# Altium footprint library 615008160021.PcbLib: 1 footprints
Each footprint in its own frame and in the unit in brackets; x right, y up, seen from the top. Pads: shape width x height; smd on the part's side, far side on the other; paste and mask are expansions set on the pad; w line width, h text height; cw(c..) or ccw(c..) is an arc to the next point about the centre after c.
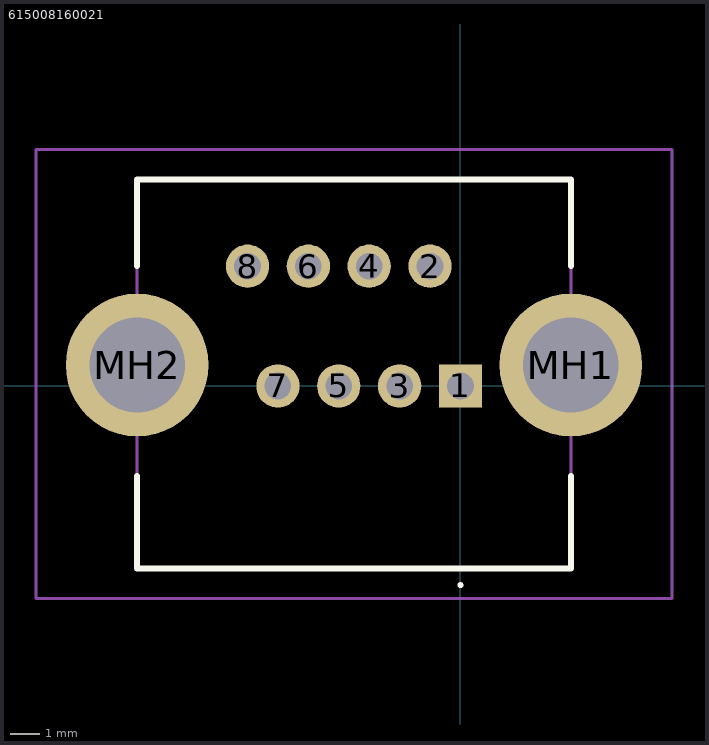
[diagram p0: the footprint, top view; thin cyan lines are the x and y axes]

## 615008160021 [mm]
pads (10):
  rect 1.446x1.446 hole 0.89: 1(0,0)
  round 1.446 hole 0.89: 2(-1.016,4) 3(-2.032,0) 4(-3.048,4) 5(-4.064,0) 6(-5.08,4) 7(-6.096,0) 8(-7.11,4)
  round 4.77 hole 3.18: MH1(3.685,0.7) MH2(-10.795,0.7)
Top Overlay:
  lines w0.1: 0,-6.7 cw(c0,-6.65) 0,-6.6 ; 0,-6.7 0,-6.7 ; 0,-6.7 ccw(c0,-6.65) 0,-6.6 ; 0,-6.6 0,-6.6
  lines w0.2: -10.795,-3 -10.795,-6.1 3.685,-6.1 3.685,-3 ; -10.795,4 -10.795,6.9 3.685,6.9 3.685,4
Mechanical 15:
  lines w0.1: -10.795,-6.1 3.685,-6.1 3.685,6.9 -10.795,6.9 -10.795,-6.1
Mechanical 20:
  lines w0.1: -14.18,-7.1 7.07,-7.1 7.07,7.9 -14.18,7.9 -14.18,-7.1